# Altium footprint library FC-13532P7680KA-A5.PcbLib: 1 footprints
Each footprint in its own frame and in the unit in brackets; x right, y up, seen from the top. Pads: shape width x height; smd on the part's side, far side on the other; paste and mask are expansions set on the pad; w line width, h text height; cw(c..) or ccw(c..) is an arc to the next point about the centre after c.
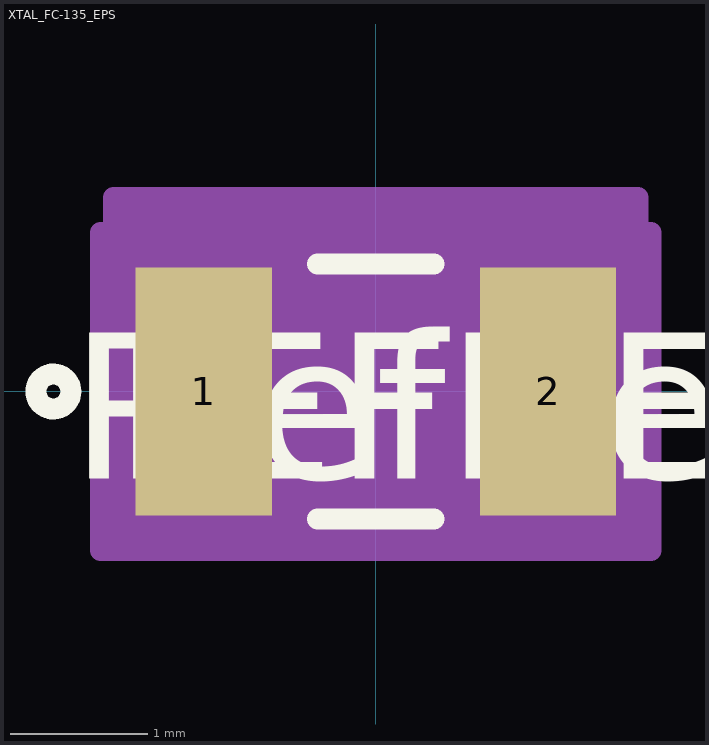
[diagram p0: the footprint, top view; thin cyan lines are the x and y axes]

## XTAL_FC-135_EPS [mil]
pads (2):
  rect 39x71 smd paste+0 mask+0: 1(-49.21,0) 2(49.21,0)
Top Overlay:
  circle w6: c-92.21,0 r5
  lines w6: -16.65,-36.5 16.65,-36.5 ; -16.65,36.5 16.65,36.5
  text "RefDes" at -75,-25 h50
  text "REFDES" at -87.5,-25 h50
Mechanical 13:
  circle w0: c-29.71,0 r3
  lines w0: -12,31.5 ccw(c0,31.5) 12,31.5
  lines w1: -65,-31.5 65,-31.5 65,31.5 -65,31.5 -65,-31.5
  text "RefDes2" at -87.5,-25 h50
Mechanical 15:
  region: -75,-45.5 -78.71,-45.5 -78.71,45.5 -75,45.5 -75,55.5 75,55.5 75,45.5 78.71,45.5 78.71,-45.5 75,-45.5
  lines w6: -75,-45.5 -78.71,-45.5 -78.71,45.5 -75,45.5 -75,55.5 75,55.5 75,45.5 78.71,45.5 78.71,-45.5 75,-45.5 ; -75,-45.5 -75,-45.5 ; -75,-45.5 75,-45.5 ; 75,-45.5 75,-45.5
3D body "XTAL_FC-135_EPS.step": height 35.12, standoff 0, extent -65,-35.51 65,35.51